# Altium footprint library KM_ALTIUM.PcbLib: 265 footprints (part 4 of 17)
Each footprint in its own frame and in the unit in brackets; x right, y up, seen from the top. Pads: shape width x height; smd on the part's side, far side on the other; paste and mask are expansions set on the pad; w line width, h text height; cw(c..) or ccw(c..) is an arc to the next point about the centre after c.
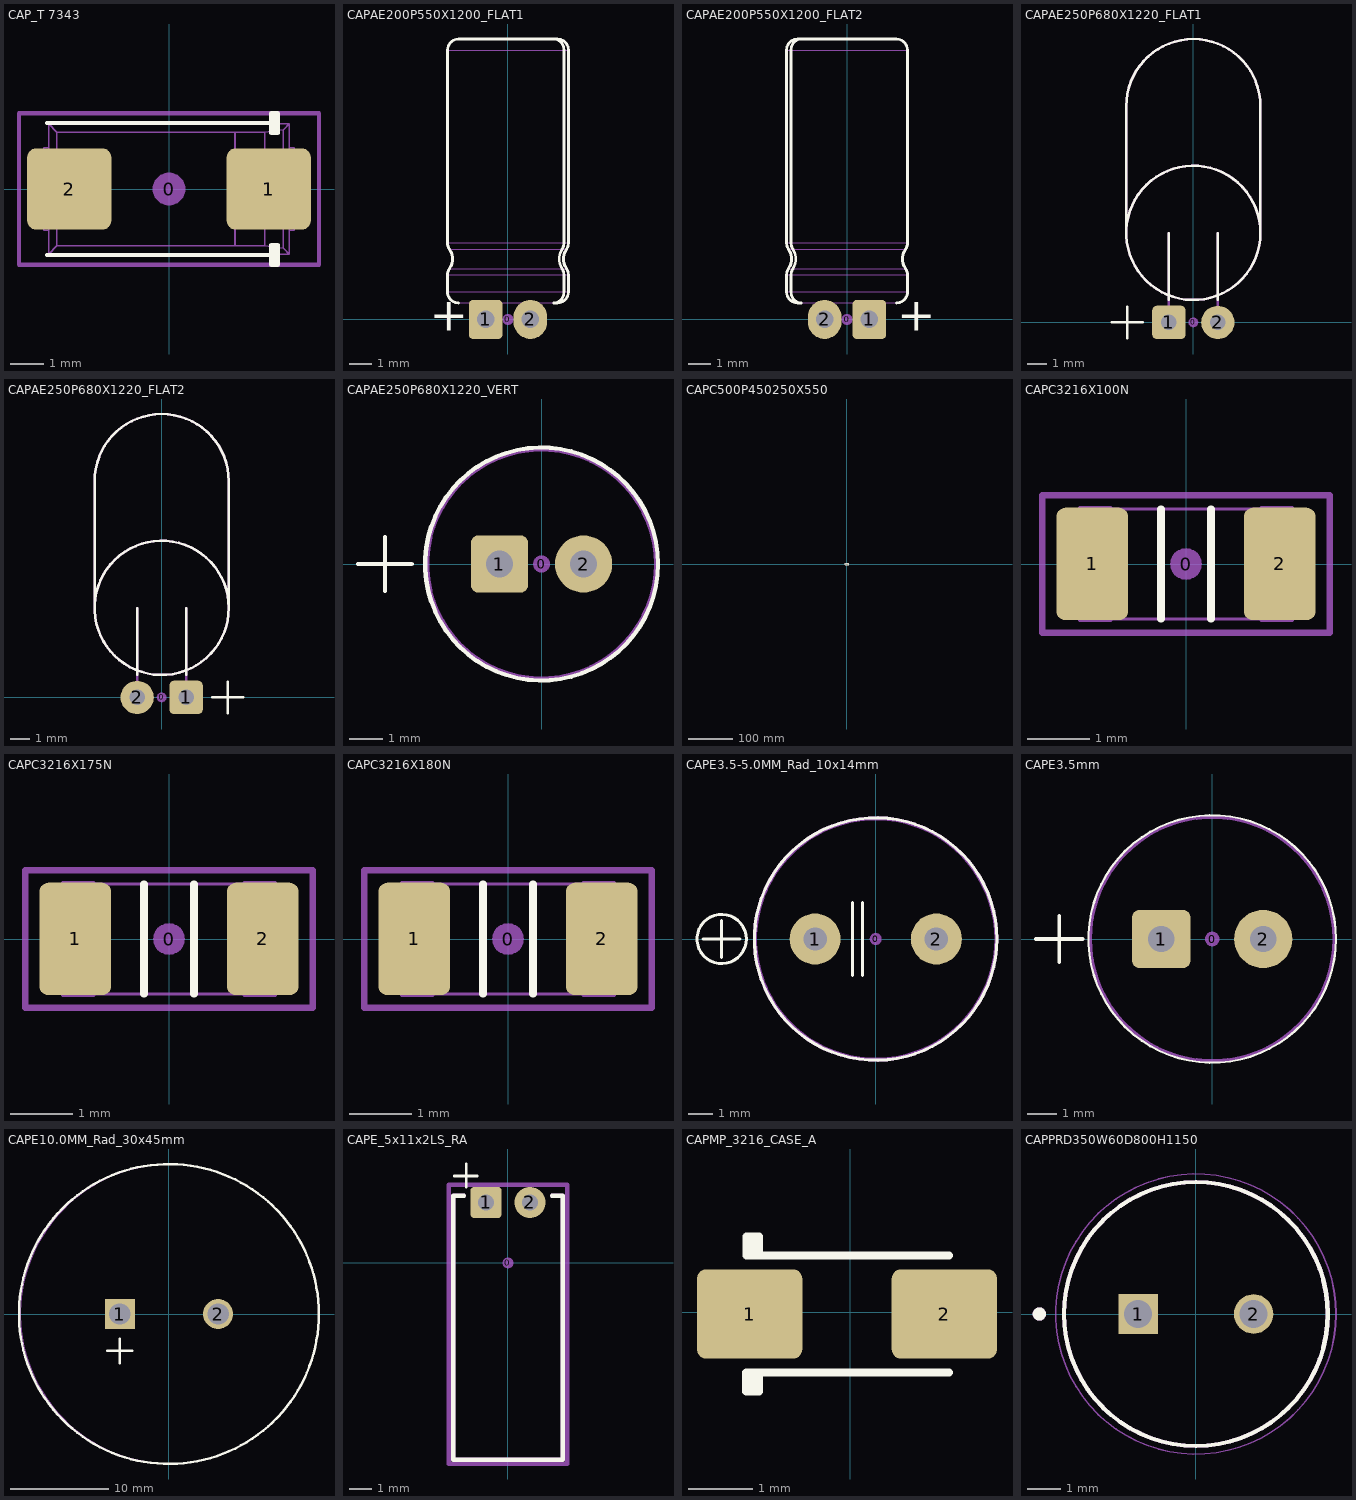
[diagram p3: the footprints below, top view; thin cyan lines are the x and y axes]

## CAP_T 7343 [mm]
pads (3):
  round 1 on Mech15: 0(0,0)
  rrect20% 2.55x2.45 smd: 1(3.025,0) 2(-3.025,0)
Top Overlay:
  lines w0.127: -3.7,-2 3.3,-2 ; -3.7,2 3.3,2 ; 3.2,-2.3 3.2,-2 3.2,-1.7 ; 3.2,1.7 3.2,2 3.2,2.3 ; 3.1,-2.3 3.3,-2.3 3.3,-1.7 3.1,-1.7 3.1,-2 3.1,-2.3 ; 3.1,1.7 3.3,1.7 3.3,2.3 3.1,2.3 3.1,2 3.1,1.7
Mechanical 13:
  lines w0.05: -3.8,-0.5 -3.65,-0.5 ; -3.8,0.5 -3.65,0.5 ; -3.67,-0.5 -3.67,0.5 ; -3.65,-1.25 -3.8,-1.25 -3.8,1.25 -3.65,1.25 ; 2.901,-0.575 2.901,0.575 ; 3.65,-1.25 3.8,-1.25 3.8,1.25 3.65,1.25 ; 3.65,-0.5 3.8,-0.5 ; 3.65,0.5 3.8,0.5 ; 3.67,-0.5 3.67,0.5 ; -3.65,-1.975 3.65,-1.975 ; -3.65,-1.975 -3.65,1.975 ; -3.65,-1.975 -3.401,-1.726 ; -3.65,1.975 3.65,1.975 ; -3.65,1.975 -3.401,1.726 ; -3.401,-1.726 2.001,-1.727 ; -3.401,-1.726 -3.401,1.726 ; -3.401,1.726 2.001,1.727 ; 2.001,-1.727 2.001,-0.575 2.907,-0.575 2.907,-1.727 ; 2.001,-1.727 2.907,-1.727 ; 2.001,1.727 2.001,0.575 2.907,0.575 2.907,1.727 ; 2.001,1.727 2.907,1.727 ; 2.907,-1.727 3.471,-1.796 ; 2.907,1.727 3.471,1.796 ; 3.471,-1.796 3.471,1.796 ; 3.471,-1.796 3.65,-1.975 ; 3.471,1.796 3.65,1.975 ; 3.65,-1.975 3.65,1.975
Mechanical 15:
  lines w0.127: -4.55,-2.3 -4.55,2.3 4.55,2.3 4.55,-2.3 -4.55,-2.3
3D body "CAPMP7343X310N.STEP": height 3.1, standoff 0, extent -3.8,-1.975 3.8,1.975

## CAPAE200P550X1200_FLAT1 [mil]
height 216.54
pads (3):
  round 20 on Mech15: 0(0,0)
  rrect25% 60x70 hole 31.5: 1(-40,0)
  oval 60x70 hole 31.5: 2(40,0)
Top Overlay:
  lines w5: -88.58,29.53 cw(c-88.58,49.25) -108.31,49.25 -108.31,79.64 cw(c-88.58,79.64) -104.79,90.88 ccw(c-129.92,108.31) -104.79,125.74 cw(c-88.58,136.98) -108.31,136.98 -108.31,482.32 cw(c-88.58,482.32) -88.58,502.05 81.84,502.05 cw(c81.06,483.05) 100.06,482.32 100.06,136.98 cw(c79.2,136.92) 96.81,125.74 ccw(c124.34,108.31) 96.81,90.88 cw(c79.2,79.7) 100.06,79.64 100.06,49.25 cw(c81.06,48.53) 81.84,29.53 ; 82.99,29.57 88.58,29.57 ccw(c88.58,49.25) 108.27,49.25 108.27,79.64 ccw(c88.58,79.64) 104.76,90.86 cw(c129.92,108.31) 104.76,125.76 ccw(c88.58,136.98) 108.27,136.98 108.27,482.32 ccw(c88.58,482.32) 88.58,502.01 82.99,502.01
  text "+" at -140,-20 h60
Mechanical 13:
  lines w1.97: -49.21,19.68 -29.53,19.68 ; -49.21,29.53 -49.21,0 ccw(c-39.37,0) -29.53,0 -29.53,29.53 ; 29.53,19.68 49.21,19.68 ; 29.53,29.53 29.53,0 ccw(c39.37,0) 49.21,0 49.21,29.53 ; 82.99,29.57 88.58,29.57 ccw(c88.58,49.25) 108.27,49.25 ; 82.99,502.01 88.58,502.01 cw(c88.58,482.32) 108.27,482.32 ; -108.31,49.25 ccw(c-88.58,49.25) -88.58,29.53 81.84,29.53 ccw(c81.06,48.53) 100.06,49.25 100.06,79.64 ccw(c79.2,79.7) 96.81,90.88 ; -108.31,49.25 -108.31,79.64 ; -108.31,49.25 108.27,49.25 ; -108.31,79.64 cw(c-88.58,79.64) -104.79,90.88 ; -108.31,79.64 108.27,79.64 ; -108.31,136.98 ccw(c-88.58,136.98) -104.79,125.74 ; -108.31,136.98 -108.31,482.32 ; -108.31,136.98 108.27,136.98 ; -108.31,482.32 cw(c-88.58,482.32) -88.58,502.05 81.84,502.05 cw(c81.06,483.05) 100.06,482.32 100.06,136.98 cw(c79.2,136.92) 96.81,125.74 ; -108.31,482.32 108.27,482.32 ; -104.79,90.88 ccw(c-129.92,108.31) -104.79,125.74 ; -104.79,90.88 96.81,90.88 ; -104.79,125.74 96.81,125.74 ; 96.81,90.88 cw(c124.34,108.31) 96.81,125.74 ; 96.81,90.88 104.76,90.86 ; 96.81,125.74 104.76,125.76 ; 104.76,90.86 cw(c88.58,79.64) 108.27,79.64 ; 104.76,90.86 cw(c129.92,108.31) 104.76,125.76 ; 104.76,125.76 ccw(c88.58,136.98) 108.27,136.98 ; 108.27,49.25 108.27,79.64 ; 108.27,136.98 108.27,482.32
3D body "CAPAE200P550X1200_FLAT1.STEP": height 215.69, standoff -70, extent -107.37,-9.82 107.35,502.05

## CAPAE200P550X1200_FLAT2 [mil]
height 216.54
pads (3):
  round 20 on Mech15: 0(0,0)
  rrect25% 60x70 hole 31.5: 1(40,0)
  oval 60x70 hole 31.5: 2(-40,0)
Top Overlay:
  lines w5: -82.99,29.57 -88.58,29.57 cw(c-88.58,49.25) -108.27,49.25 -108.27,79.64 cw(c-88.58,79.64) -104.76,90.86 ccw(c-129.92,108.31) -104.76,125.76 cw(c-88.58,136.98) -108.27,136.98 -108.27,482.32 cw(c-88.58,482.32) -88.58,502.01 -82.99,502.01 ; -81.84,29.53 cw(c-81.06,48.53) -100.06,49.25 -100.06,79.64 cw(c-79.2,79.7) -96.81,90.88 ccw(c-124.34,108.31) -96.81,125.74 cw(c-79.2,136.92) -100.06,136.98 -100.06,482.32 cw(c-81.06,483.05) -81.84,502.05 88.58,502.05 cw(c88.58,482.32) 108.31,482.32 108.31,136.98 cw(c88.58,136.98) 104.79,125.74 ccw(c129.92,108.31) 104.79,90.88 cw(c88.58,79.64) 108.31,79.64 108.31,49.25 cw(c88.58,49.25) 88.58,29.53
  text "+" at 90,-20 h60
Mechanical 13:
  lines w1.97: -82.99,29.57 -88.58,29.57 cw(c-88.58,49.25) -108.27,49.25 ; -82.99,502.01 -88.58,502.01 ccw(c-88.58,482.32) -108.27,482.32 ; -49.21,19.68 -29.53,19.68 ; -49.21,29.53 -49.21,0 ccw(c-39.37,0) -29.53,0 -29.53,29.53 ; 29.53,19.68 49.21,19.68 ; 29.53,29.53 29.53,0 ccw(c39.37,0) 49.21,0 49.21,29.53 ; -108.27,49.25 108.31,49.25 ; -108.27,49.25 -108.27,79.64 ; -108.27,79.64 cw(c-88.58,79.64) -104.76,90.86 ; -108.27,79.64 108.31,79.64 ; -108.27,136.98 ccw(c-88.58,136.98) -104.76,125.76 ; -108.27,136.98 108.31,136.98 ; -108.27,136.98 -108.27,482.32 ; -108.27,482.32 108.31,482.32 ; -104.76,90.86 ccw(c-129.92,108.31) -104.76,125.76 ; -104.76,90.86 -96.81,90.88 ; -104.76,125.76 -96.81,125.74 ; -96.81,90.88 ccw(c-124.34,108.31) -96.81,125.74 ; -96.81,90.88 ccw(c-79.2,79.7) -100.06,79.64 -100.06,49.25 ccw(c-81.06,48.53) -81.84,29.53 88.58,29.53 ccw(c88.58,49.25) 108.31,49.25 ; -96.81,90.88 104.79,90.88 ; -96.81,125.74 cw(c-79.2,136.92) -100.06,136.98 -100.06,482.32 cw(c-81.06,483.05) -81.84,502.05 88.58,502.05 cw(c88.58,482.32) 108.31,482.32 ; -96.81,125.74 104.79,125.74 ; 104.79,90.88 cw(c129.92,108.31) 104.79,125.74 ; 104.79,90.88 cw(c88.58,79.64) 108.31,79.64 ; 104.79,125.74 ccw(c88.58,136.98) 108.31,136.98 ; 108.31,49.25 108.31,79.64 ; 108.31,136.98 108.31,482.32
3D body "CAPAE200P550X1200_FLAT2.STEP": height 215.69, standoff -70, extent -107.33,-9.82 107.39,502.05

## CAPAE250P680X1220_FLAT1 [mm]
height 6.8
pads (3):
  round 0.508 on Mech15: 0(0,0)
  rrect25% 1.7x1.7 hole 0.8: 1(-1.25,0)
  round 1.7 hole 0.8: 2(1.25,0)
Top Overlay:
  circle w0.127: c0,4.572 r3.429
  lines w0.127: -4.18,0 -2.58,0 ; -3.429,4.572 -3.429,11.049 cw(c0,11.049) 3.429,11.049 3.429,4.572 ; -3.38,-0.8 -3.38,0.8 ; -1.25,1.143 -1.25,4.552 ; 1.25,1.143 1.25,4.552
Mechanical 13:
  circle w0.127: c0,4.572 r3.429
  lines w0.127: -3.429,4.572 -3.429,11.049 cw(c0,11.049) 3.429,11.049 3.429,4.572 ; -1.25,0 -1.25,4.552 ; 1.25,0 1.25,4.552
3D body "CAPAE250P680X1220_FLAT1.STEP": height 6.77, standoff -1.78, extent -3.372,-0.249 3.371,12.952

## CAPAE250P680X1220_FLAT2 [mm]
height 6.8
pads (3):
  round 0.508 on Mech15: 0(0,0)
  rrect25% 1.7x1.7 hole 0.8: 1(1.25,0)
  round 1.7 hole 0.8: 2(-1.25,0)
Top Overlay:
  circle w0.127: c0,4.572 r3.429
  lines w0.127: -3.429,4.572 -3.429,11.049 cw(c0,11.049) 3.429,11.049 3.429,4.572 ; -1.25,1.143 -1.25,4.552 ; 1.25,1.143 1.25,4.552 ; 2.58,0 4.18,0 ; 3.38,-0.8 3.38,0.8
Mechanical 13:
  circle w0.127: c0,4.572 r3.429
  lines w0.127: -3.429,4.572 -3.429,11.049 cw(c0,11.049) 3.429,11.049 3.429,4.572 ; -1.25,0 -1.25,4.552 ; 1.25,0 1.25,4.552
3D body "CAPAE250P680X1220_FLAT2.STEP": height 6.77, standoff -1.78, extent -3.371,-0.249 3.372,12.952

## CAPAE250P680X1220_VERT [mm]
height 12.2
pads (3):
  round 0.508 on Mech15: 0(0,0)
  rrect25% 1.7x1.7 hole 0.8: 1(-1.25,0)
  round 1.7 hole 0.8: 2(1.25,0)
Top Overlay:
  circle w0.127: c0,0 r3.459
  lines w0.127: -5.45,0 -3.85,0 ; -4.65,-0.8 -4.65,0.8
Mechanical 13:
  circle w0.127: c0,0 r3.4
3D body "CAPAE250P680X1220_VERT.STEP": height 12.2, standoff -1.78, extent -3.372,-3.372 3.371,3.372

## CAPC500P450250X550 [mm] "TDK FK24 radial ceramic capacitor"
height 5.5
pads (3):
  round 0.508 on Mech15: 0(0,0)
  rrect25% 1.905x1.905 hole 0.8: 1(-2.5,0)
  round 1.905 hole 0.8: 2(2.5,0)
Top Overlay:
  lines w0.127: -3.81,-1.27 -3.81,1.27 3.81,1.27 3.81,-1.27 -3.81,-1.27
Mechanical 13:
  lines w0.127: -2.5,-0.3 cw(c-2.5,0) -2.5,0.3 ; -2.25,-0.523 -2.248,-0.511 -2.24,-0.497 -2.227,-0.48 -2.21,-0.461 -2.186,-0.439 -2.157,-0.415 -2.122,-0.387 -2.083,-0.357 -2.046,-0.327 -2.006,-0.292 -1.995,-0.281 -1.983,-0.268 -1.972,-0.254 -1.962,-0.238 -1.958,-0.229 -1.955,-0.218 -1.954,-0.211 -1.953,-0.203 ; -2.25,0.523 cw(c-3.279,-0.727) -1.953,0.203 ; -2.236,-0.718 cw(c-1.896,-0.22) -2.5,-0.217 -2.5,0.217 cw(c-1.896,0.221) -2.232,0.723 -2.23,0.724 -2.206,0.741 ; -2.232,-0.723 -2.225,-0.727 -2.205,-0.742 ; 2.205,0.742 2.225,0.727 2.232,0.723 ; 2.206,-0.741 2.23,-0.724 2.232,-0.723 ccw(c1.896,-0.221) 2.5,-0.217 2.5,0.217 ccw(c1.896,0.22) 2.236,0.718 ; 2.25,-0.523 2.243,-0.502 2.225,-0.477 2.187,-0.44 2.134,-0.397 2.073,-0.349 2.007,-0.293 1.986,-0.271 1.967,-0.246 1.956,-0.223 1.953,-0.203 ; 2.25,0.523 2.24,0.497 2.21,0.461 2.157,0.415 2.083,0.357 2.046,0.327 2.006,0.292 1.983,0.268 1.962,0.238 1.955,0.218 1.953,0.203 ; 2.5,-0.3 ccw(c2.5,0) 2.5,0.3 ; -1.953,-0.203 1.953,-0.203 ; -1.953,-0.203 -1.953,0.203 ; -1.953,0.203 1.953,0.203 ; -1.8,-1.003 cw(c-1.777,-0.913) -1.867,-0.935 cw(c9.111,-1.292) -1.819,-0.203 -1.819,0.203 ccw(c-168.083,-10.401) -1.867,0.935 cw(c-1.777,0.912) -1.8,1.003 ; -1.8,-1.003 cw(c-1.8,-0.553) -2.25,-0.553 -2.25,0.553 cw(c-1.8,0.553) -1.8,1.003 ; -1.8,-1.003 1.8,-1.003 ; -1.8,1.003 1.8,1.003 ; 1.8,-1.003 ccw(c1.777,-0.912) 1.867,-0.935 cw(c168.269,10.414) 1.819,-0.203 1.819,0.203 ccw(c-9.111,1.292) 1.867,0.935 ccw(c1.777,0.913) 1.8,1.003 ; 1.8,-1.003 ccw(c1.8,-0.553) 2.25,-0.553 2.25,0.553 ccw(c1.8,0.553) 1.8,1.003 ; 1.953,-0.203 1.953,0.203
3D body "TDK FK24 ceramic capacitor.STEP": height 5.47, standoff -2.54, extent -2.797,-1.003 2.798,1.003

## CAPC3216X100N [mm] "Chip Capacitor, Body 3.2x1.6mm, 1.0mm H, EIA 1206, IPC Medium Density"
height 1
pads (3):
  round 0.508 on Mech15: 0(0,0)
  rrect25% 1.15x1.8 smd: 1(-1.5,0) 2(1.5,0)
Top Overlay:
  lines w0.127: -0.4,-0.876 -0.4,0.876 ; 0.4,-0.876 0.4,0.876
Mechanical 13:
  lines w0.05: -1.2,-0.88 1.2,-0.88 ; -1.2,0.88 1.2,0.88 ; -1.7,-0.9 -1.2,-0.9 -1.2,0.9 -1.7,0.9 -1.7,-0.9 ; 1.2,-0.9 1.7,-0.9 1.7,0.9 1.2,0.9 1.2,-0.9
Mechanical 15:
  lines w0.1: -2.3,-1.1 -2.3,1.1 2.3,1.1 2.3,-1.1 -2.3,-1.1
3D body "CAPC3216X100N - 1206 (3216 metric).STEP": height 1, standoff 0, extent -1.7,-0.9 1.7,0.9

## CAPC3216X175N [mm] "Chip Capacitor, Body 3.2x1.6mm, 1.75mm H, EIA 1206, IPC Medium Density"
height 1.75
pads (3):
  round 0.508 on Mech15: 0(0,0)
  rrect25% 1.15x1.8 smd: 1(-1.5,0) 2(1.5,0)
Top Overlay:
  lines w0.127: -0.4,-0.876 -0.4,0.876 ; 0.4,-0.876 0.4,0.876
Mechanical 13:
  lines w0.05: -1.2,-0.88 1.2,-0.88 ; -1.2,0.88 1.2,0.88 ; -1.7,-0.9 -1.2,-0.9 -1.2,0.9 -1.7,0.9 -1.7,-0.9 ; 1.2,-0.9 1.7,-0.9 1.7,0.9 1.2,0.9 1.2,-0.9
Mechanical 15:
  lines w0.1: -2.3,-1.1 -2.3,1.1 2.3,1.1 2.3,-1.1 -2.3,-1.1
3D body "CAPC3216X175N - 1206 (3216 metric).STEP": height 1.75, standoff 0, extent -1.7,-0.9 1.7,0.9

## CAPC3216X180N [mm] "Chip Capacitor, Body 3.2x1.6mm, 1.8mm H, EIA 1206, IPC Medium Density"
height 1.8
pads (3):
  round 0.508 on Mech15: 0(0,0)
  rrect25% 1.15x1.8 smd: 1(-1.5,0) 2(1.5,0)
Top Overlay:
  lines w0.127: -0.4,-0.876 -0.4,0.876 ; 0.4,-0.876 0.4,0.876
Mechanical 13:
  lines w0.05: -1.2,-0.88 1.2,-0.88 ; -1.2,0.88 1.2,0.88 ; -1.7,-0.9 -1.7,0.9 -1.2,0.9 -1.2,-0.9 -1.7,-0.9 ; 1.2,-0.9 1.2,0.9 1.7,0.9 1.7,-0.9 1.2,-0.9
Mechanical 15:
  lines w0.1: -2.3,-1.1 2.3,-1.1 2.3,1.1 -2.3,1.1 -2.3,-1.1
3D body "CAPC3216X180N - 1206 (3216 metric).STEP": height 1.8, standoff 0, extent -1.7,-0.9 1.7,0.9

## CAPE3.5-5.0MM_Rad_10x14mm [mm] "3.5 & 5.0mm Pitch Radial Capacitor 10x14mm DxH"
height 14
pads (3):
  round 0.5 on Mech15: 0(0,0)
  round 2.1 hole 0.965: 1(-2.5,0) 2(2.5,0)
Top Overlay:
  circle w0.127: c-6.35,0 r1.016
  circle w0.127: c0,0 r5
  lines w0.127: -7.112,0 -5.588,0 ; -6.35,-0.762 -6.35,0.762 ; -0.95,-1.5 -0.95,1.5 ; -0.55,-1.5 -0.55,1.5
Mechanical 13:
  circle w0.127: c0,0 r4.953
Mechanical 15:
  circle w0.127: c0,0 r5
3D body "ElectroCap10x14mm.stp": height 13.99, standoff -3.51, extent -5.25,-5.237 5.206,5.237

## CAPE3.5mm [mm]
pads (3):
  round 0.508 on Mech15: 0(0,0)
  rrect25% 2x2 hole 0.9: 1(-1.75,0)
  round 2 hole 0.9: 2(1.75,0)
Top Overlay:
  circle w0.076: c0,0 r4.25
  lines w0.127: -6.05,0 -4.45,0 ; -5.25,-0.8 -5.25,0.8
Mechanical 13:
  circle w0.127: c0,0 r4.191
3D body: height 7.1, standoff 0.1, extent -4.25,-4.25 4.216,4.233

## CAPE10.0MM_Rad_30x45mm [mil] "10mm Pitch Radial Capacitor"
height 1771.65
pads (2):
  rect 120x120 hole 86: 1(-196.85,0)
  round 120 hole 86: 2(196.85,0)
Top Overlay:
  circle w10: c0,0 r600.39
  lines w10: -246.06,-147.64 -147.64,-147.64 ; -196.85,-196.85 -196.85,-98.43
Mechanical 15:
  circle w5: c3.15,0 r597.8
3D body "ElectroCap45x30mm.stp": height 1771.65, standoff -137.8, extent -585.73,-588.1 589.23,588.11

## CAPE_5x11x2LS_RA [mm] "Capacitor, electrolytic, radial can, laid over"
height 5
pads (3):
  round 0.5 on Mech15: 0(0,0)
  rrect25% 1.422x1.422 hole 0.711: 1(-1,2.75)
  round 1.422 hole 0.711: 2(1,2.75)
Top Overlay:
  lines w0.127: -2.45,3.95 -1.4,3.95 ; -1.9,3.45 -1.9,4.5
  lines w0.2: -2,3.05 -2.5,3.05 -2.5,-8.95 0,-8.95 2.5,-8.95 2.5,3.05 2,3.05
Mechanical 13:
  lines w0.2: -2,3.05 -2.5,3.05 -2.5,-8.95 0,-8.95 2.5,-8.95 2.5,3.05 2,3.05
Mechanical 15:
  lines w0.2: -2.7,-9.15 -2.7,3.55 2.7,3.55 2.7,-9.15 -2.7,-9.15
3D body "Cap, elec, radial, 5x11x2LS, RA.STEP": height 5.1, standoff -2.2, extent -2.5,-8.947 2.5,3

## CAPMP_3216_CASE_A [mm] "Tatalum Capacitor SMD (3216_1206), Molded body capacitor"
height 1.6
pads (2):
  rrect20% 1.65x1.4 smd: 1(-1.575,-0.025) 2(1.475,-0.025)
Top Overlay:
  lines w0.127: -1.528,-1.24 -1.528,-0.94 ; -1.525,0.889 -1.525,1.189 ; -1.428,-0.94 -1.428,-1.24 -1.628,-1.24 -1.628,-0.94 1.549,-0.94 ; -1.425,0.889 -1.425,1.189 -1.625,1.189 -1.625,0.889 1.549,0.889
3D body "User Library-CaseA_3216-18.STEP": height 1.6, standoff 0, extent -1.651,-0.825 1.549,0.775

## CAPPRD350W60D800H1150 [mm]
pads (2):
  rect 1.2x1.2 / inner round 1.2 / far side rect 1.2x1.2 hole 0.85: 1(-1.75,0)
  round 1.2 hole 0.85: 2(1.75,0)
Top Overlay:
  circle w0.2: c-4.75,0 r0.1
  circle w0.127: c0,0 r4
Mechanical 13:
  circle w0.2: c-4.75,0 r0.1
  circle w0.127: c0,0 r4
Mechanical 15:
  circle w0.05: c0,0 r4.25
3D body "step_temp.STEP": height 11.5, standoff -17, extent -4,-4 4,4